# Altium footprint library U-Disk ShortUDP.PcbLib: 1 footprints
Each footprint in its own frame and in the unit in brackets; x right, y up, seen from the top. Pads: shape width x height; smd on the part's side, far side on the other; paste and mask are expansions set on the pad; w line width, h text height; cw(c..) or ccw(c..) is an arc to the next point about the centre after c.
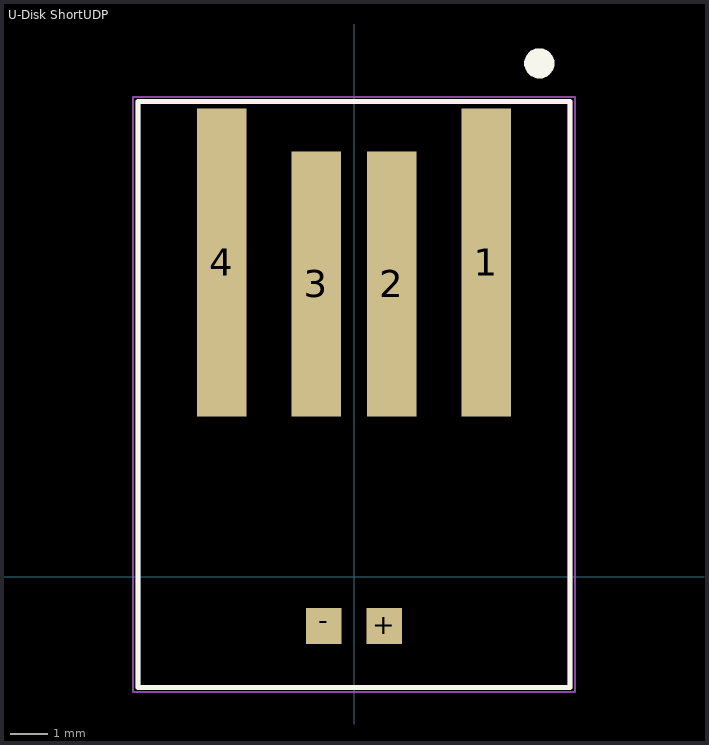
[diagram p0: the footprint, top view; thin cyan lines are the x and y axes]

## U-Disk ShortUDP [mm] "U-Disk ShortUDP"
pads (6):
  rect 1.3x8.14 smd: 1(3.5,8.32) 4(-3.5,8.32)
  rect 1.3x7 smd: 2(1,7.75) 3(-1,7.75)
  rect 0.95x0.95 smd: +(0.8,-1.295) -(-0.8,-1.295)
Top Overlay:
  circle w0.4: c4.902,13.585 r0.2
  lines w0.127: -5.715,-2.921 -5.715,12.573 5.715,12.573 5.715,-2.921 -5.715,-2.921
Mechanical 13:
  lines w0.127: -5.715,-2.921 5.715,-2.921 5.715,12.573 -5.715,12.573 -5.715,-2.921
Mechanical 15:
  lines w0.05: -5.842,-3.048 5.842,-3.048 5.842,12.7 -5.842,12.7 -5.842,-3.048
3D body "U-Disk ShortUDP.STEP": height 1.37, standoff 0.02, extent -5.625,-2.804 5.625,12.446